# Altium schematic symbol library ADF4350BCPZ-RL7.SchLib: 1 symbol
Pins are listed as number, name and electrical type; pins without a type are passive.

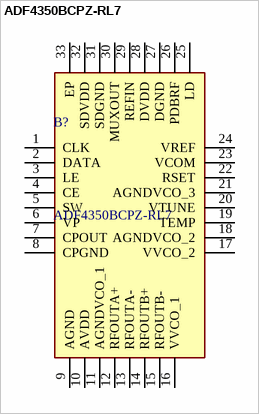
[diagram p0: symbol ADF4350BCPZ-RL7]

## ADF4350BCPZ-RL7
designator B?
Wideband Synthesizer with Integrated VCO; Manufacturer_Name: Analog Devices; Geometry.Height: 1mm; Mouser Part Number: 584-ADF4350BCPZ-R7; Mouser Price/Stock: https://www.mouser.co.uk/ProductDetail/Analog-Devices/ADF4350BCPZ-RL7?qs=BpaRKvA4VqHLeFsdtKy2aw%3D%3D; Manufacturer_Part_Number: ADF4350BCPZ-RL7; Datasheet Link: http://componentsearchengine.com/Datasheets/1/ADF4350BCPZ-RL7.pdf
footprint QFN50P500X500X100-33N-D
pins: 1 CLK, 2 DATA, 3 LE, 4 CE, 5 SW, 6 VP, 7 CPOUT, 8 CPGND, 9 AGND, 10 AVDD, 11 AGNDVCO_1, 12 RFOUTA+, 13 RFOUTA-, 14 RFOUTB+, 15 RFOUTB-, 16 VVCO_1, 17 VVCO_2, 18 AGNDVCO_2, 19 TEMP, 20 VTUNE, 21 AGNDVCO_3, 22 RSET, 23 VCOM, 24 VREF, 25 LD, 26 PDBRF, 27 DGND, 28 DVDD, 29 REFIN, 30 MUXOUT, 31 SDGND, 32 SDVDD, 33 EP